# EAGLE library part 6200XX11821_62002011821 (library WR-PHD)
WR-PHD 2.00 mm Socket Header Article Properties Pins 2 unitless; 4 unitless; 6 unitless; 8 unitless; 10 unitless; 20 unitless; 32 unitless General Information Operating Temperature -40 °C up to +105 °C Compliance Lead free / RoHS Pitch 2 mm Durability 50 Cycles Rows Single Gender Socket Header Type Straight Material Properties Insulator Material PA9T Insulator Flammability Rating UL94 V-0 Contact Material Copper Alloy Contact Plating Gold Contact Type Stamped Certification UL Approval E323964 Packaging Properties Packaging Tube Electrical Properties IR 2 A Withstanding Voltage 500 V (AC) Contact Resistance 20 mΩ RISO 1000 MΩ <https://www.we-online.com/components/media/o33220v209%20Family_WR-PHD_6200xx11821.jpg> Details see: www.we-online.com/en/components/products/PHD_2_00_SOCKET_HEADER_6200XX11821 <www.we-online.com/catalog/PHD_2_00_SOCKET_HEADER_6200XX11821/?utm_source=eagle_model&utm_medium=description_link&utm_campaign=eisos_eagle> Updated by Ella 2024-01-31 2024 (C) Würth Elektronik
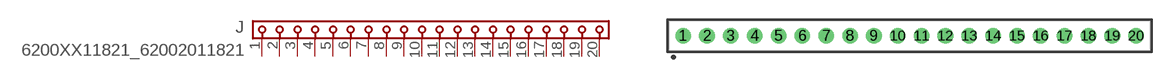
[diagram p344: symbol with the pads of 62002011821; footprint 62002011821]

Designator prefix J

## 6200XX11821_62002011821 (DATASHEET-URL: https://www.we-online.com/redexpert/spec/62002011821?ae; GENDER: Socket Header; IR: 2A; MOUNT: THT; PACKAGING: Tube; PART-NUMBER: 62002011821; PINS: 20; PITCH: 2.00 mm; ROWS: Single; TYPE: Straight; VALUE: 62002011821)  [62002011821]
1  1  pas
2  2  pas
3  3  pas
4  4  pas
5  5  pas
6  6  pas
7  7  pas
8  8  pas
9  9  pas
10  10  pas
11  11  pas
12  12  pas
13  13  pas
14  14  pas
15  15  pas
16  16  pas
17  17  pas
18  18  pas
19  19  pas
20  20  pas

## Footprint 62002011821 (pad centres in mm)
WR-PHD 2.00mm Socket Header, 20 Pins
drill 0.8: 1 -19,0; 2 -17,0; 3 -15,0; 4 -13,0; 5 -11,0; 6 -9,0; 7 -7,0; 8 -5,0; 9 -3,0; 10 -1,0; 11 1,0; 12 3,0; 13 5,0; 14 7,0; 15 9,0; 16 11,0; 17 13,0; 18 15,0; 19 17,0; 20 19,0